# Altium schematic symbol library Schlib1.SchLib: 12 symbols
Pins are listed as number, name and electrical type; pins without a type are passive.

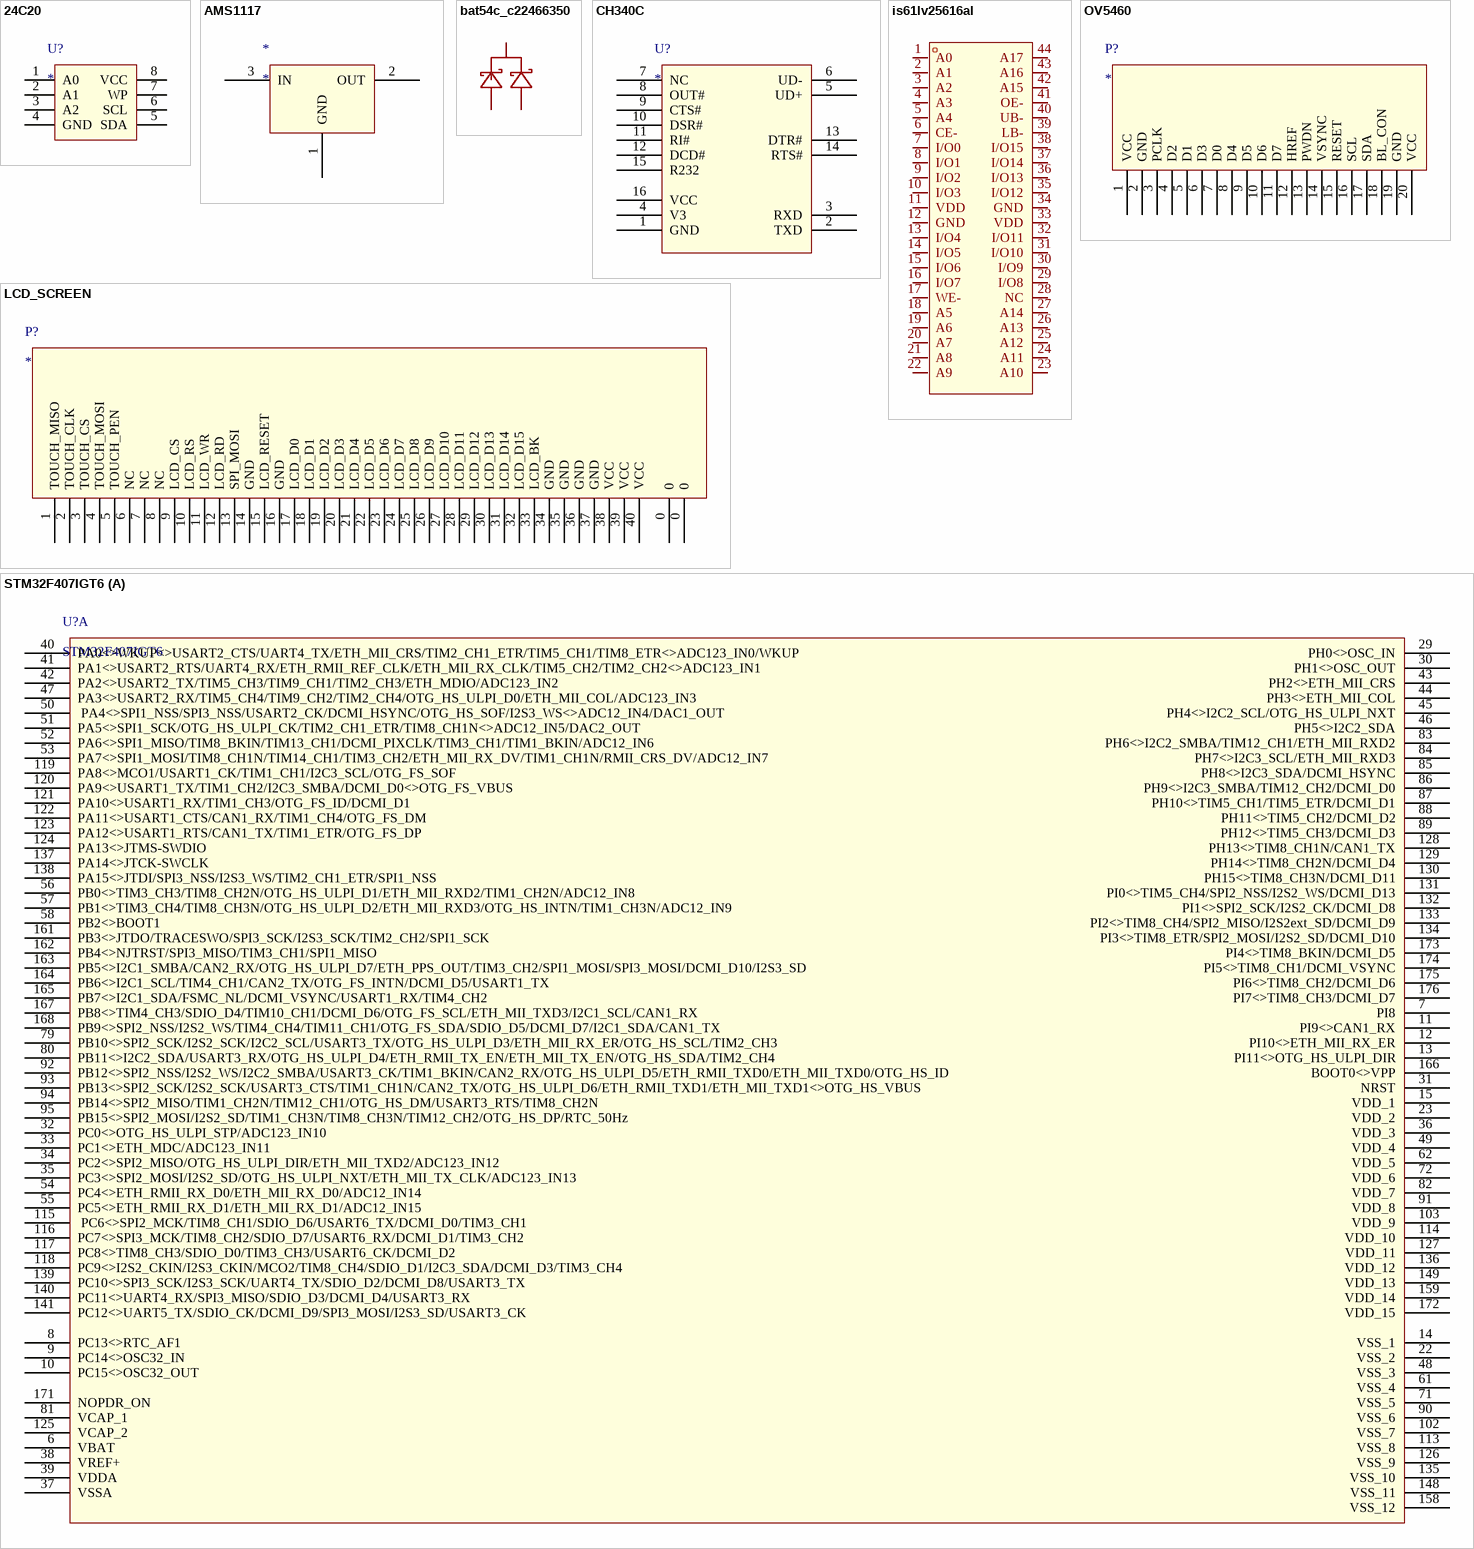
[diagram p0: symbols 24C20 to STM32F407IGT6]

## 24C20
designator U?
EEPROM
pins: 1 A0, 2 A1, 3 A2, 4 GND, 5 SDA, 6 SCL, 7 WP, 8 VCC

## AMS1117
designator *
pins: 1 GND, 2 OUT, 3 IN

## bat54c_c22466350
designator U??  (value not drawn)
二极管配置:1对共阴极;正向压降(Vf):1V@100mA;直流反向耐压(Vr):30V;整流电流:200mA;; Manufacturer: R+O(宏嘉诚); ManufacturerPart: BAT54C; AddInBom: yes; ModelId: 4be4999f02b344ffbcd0d3b39a4b0072; ModelName: SOT-23-3_L2.9-W1.3-P1.90-LS2.8-BR; ModelTransform: 110.236,114.173,0,0,0,0,0,0,0; Diode Configuration: 1对共阴极; Voltage - DC Reverse(Vr): 30V; Current - Rectified: 200mA; Reverse Leakage Current (Ir): 2uA@25V; Non-Repetitive Peak Forward Surge Current: 600mA; Symbol: BAT54C_C22466350; LCSC Part Name: 电压:30V 电流:0.2A; SupplierPart: C22466350; Supplier Footprint: SOT-23; JLCPCB Part Class: Extended Part; Datasheet: https://item.szlcsc.com/datasheet/BAT54C/24165509.html; Supplier: LCSC; ConvertToPcb: yes; FootprintName: SOT-23-3_L2.9-W1.3-P1.90-LS2.8-BR; Voltage - Forward(Vf@If): 1V@100mA; Operating Junction Temperature Range: -
footprint SOT-23-3_L2.9-W1.3-P1.90-LS2.8-BR
pins: 1 A, 2 A, 3 K

## CH340C
designator U?
pins: 1 GND, 2 TXD, 3 RXD, 4 V3, 5 UD+, 6 UD-, 7 NC, 8 OUT#, 9 CTS#, 10 DSR#, 11 RI#, 12 DCD#, 13 DTR#, 14 RTS#, 15 R232, 16 VCC

## is61lv25616al
designator U?, comment is61lv25616al-10tli-tr  (value not drawn)
存储容量:4Mbit;工作电压:3.3V~3.63V;; Manufacturer: ISSI(北京矽成); AddInBom: yes; ModelId: 560eb33016ce4e308706c564a2ec9c3c; ModelName: TSOP-44_L18.4-W10.2-H1.0-LS11.8-P0.80; ModelTransform: 465.06033,724.408,0,90,0,0,0,-0.0005,0; Interface: 并口(Parallel); Memory Size: 4Mbit; Access Time: 10ns; Supply Current (Icc): 110mA; Standby Current (Iq): 20mA; LCSC Part Name: IS61LV25616AL 10TLI TR; SupplierPart: C2063046; ManufacturerPart: IS61LV25616AL-10TLI-TR; Supplier Footprint: TSOPII-44-10.2mm; JLCPCB Part Class: Extended Part; Datasheet: https://item.szlcsc.com/datasheet/IS61LV25616AL-10TLI-TR/2154619.html; Supplier: LCSC; ConvertToPcb: yes; SymbolName: IS61LV25616AL-10TLI-TR; FootprintName: TSOP-44_L18.4-W10.2-P0.80-LS11.8-BL; Voltage - Supply: 3.3V~3.63V; Operating Temperature: -40℃~+85℃; Features: 自动掉电功能
footprint TSOP-44_L18.4-W10.2-P0.80-LS11.8-BL
pins: 1 A0, 2 A1, 3 A2, 4 A3, 5 A4, 6 CE-, 7 I/O0, 8 I/O1, 9 I/O2, 10 I/O3, 11 VDD, 12 GND, 13 I/O4, 14 I/O5, 15 I/O6, 16 I/O7, 17 WE-, 18 A5, 19 A6, 20 A7, 21 A8, 22 A9, 23 A10, 24 A11, 25 A12, 26 A13, 27 A14, 28 NC, 29 I/O8, 30 I/O9, 31 I/O10, 32 I/O11, 33 VDD, 34 GND, 35 I/O12, 36 I/O13, 37 I/O14, 38 I/O15, 39 LB-, 40 UB-, 41 OE-, 42 A15, 43 A16, 44 A17

## LCD_SCREEN
designator P?
pins: 0, 0, 1 TOUCH_MISO, 2 TOUCH_CLK, 3 TOUCH_CS, 4 TOUCH_MOSI, 5 TOUCH_PEN, 6 NC, 7 NC, 8 NC, 9 LCD_CS, 10 LCD_RS, 11 LCD_WR, 12 LCD_RD, 13 SPI_MOSI, 14 GND, 15 LCD_RESET, 16 GND, 17 LCD_D0, 18 LCD_D1, 19 LCD_D2, 20 LCD_D3, 21 LCD_D4, 22 LCD_D5, 23 LCD_D6, 24 LCD_D7, 25 LCD_D8, 26 LCD_D9, 27 LCD_D10, 28 LCD_D11, 29 LCD_D12, 30 LCD_D13, 31 LCD_D14, 32 LCD_D15, 33 LCD_BK, 34 GND, 35 GND, 36 GND, 37 GND, 38 VCC, 39 VCC, 40 VCC

## OV5460
designator P?
pins: 1 VCC, 2 GND, 3 PCLK, 4 D2, 5 D1, 6 D3, 7 D0, 8 D4, 9 D5, 10 D6, 11 D7, 12 HREF, 13 PWDN, 14 VSYNC, 15 RESET, 16 SCL, 17 SDA, 18 BL_CON, 19 GND, 20 VCC

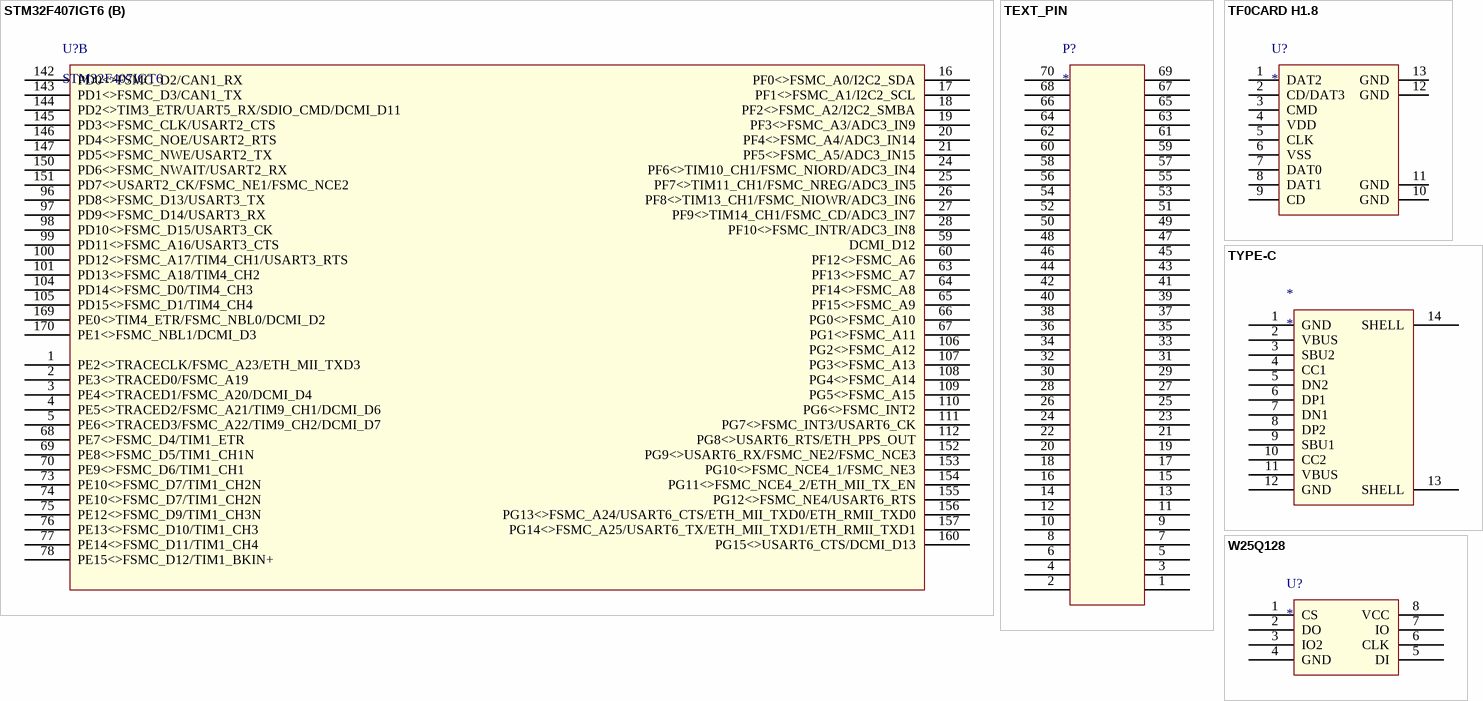
[diagram p1: symbols STM32F407IGT6 to W25Q128]

## STM32F407IGT6
designator U?
mcu
part A pins: 6 VBAT, 7 PI8, 8 PC13<>RTC_AF1, 9 PC14<>OSC32_IN, 10 PC15<>OSC32_OUT, 11 PI9<>CAN1_RX, 12 PI10<>ETH_MII_RX_ER, 13 PI11<>OTG_HS_ULPI_DIR, 14 VSS_1, 15 VDD_1, 22 VSS_2, 23 VDD_2, 29 PH0<>OSC_IN, 30 PH1<>OSC_OUT, 31 NRST, 32 PC0<>OTG_HS_ULPI_STP/ADC123_IN10, 33 PC1<>ETH_MDC/ADC123_IN11, 34 PC2<>SPI2_MISO/OTG_HS_ULPI_DIR/ETH_MII_TXD2/ADC123_IN12, 35 PC3<>SPI2_MOSI/I2S2_SD/OTG_HS_ULPI_NXT/ETH_MII_TX_CLK/ADC123_IN13, 36 VDD_3, 37 VSSA, 38 VREF+, 39 VDDA, 40 PA0<>WKUP<>USART2_CTS/UART4_TX/ETH_MII_CRS/TIM2_CH1_ETR/TIM5_CH1/TIM8_ETR<>ADC123_IN0/WKUP, 41 PA1<>USART2_RTS/UART4_RX/ETH_RMII_REF_CLK/ETH_MII_RX_CLK/TIM5_CH2/TIM2_CH2<>ADC123_IN1, 42 PA2<>USART2_TX/TIM5_CH3/TIM9_CH1/TIM2_CH3/ETH_MDIO/ADC123_IN2, 43 PH2<>ETH_MII_CRS, 44 PH3<>ETH_MII_COL, 45 PH4<>I2C2_SCL/OTG_HS_ULPI_NXT, 46 PH5<>I2C2_SDA, 47 PA3<>USART2_RX/TIM5_CH4/TIM9_CH2/TIM2_CH4/OTG_HS_ULPI_D0/ETH_MII_COL/ADC123_IN3, 48 VSS_3, 49 VDD_4, 50  PA4<>SPI1_NSS/SPI3_NSS/USART2_CK/DCMI_HSYNC/OTG_HS_SOF/I2S3_WS<>ADC12_IN4/DAC1_OUT, 51 PA5<>SPI1_SCK/OTG_HS_ULPI_CK/TIM2_CH1_ETR/TIM8_CH1N<>ADC12_IN5/DAC2_OUT, 52 PA6<>SPI1_MISO/TIM8_BKIN/TIM13_CH1/DCMI_PIXCLK/TIM3_CH1/TIM1_BKIN/ADC12_IN6, 53 PA7<>SPI1_MOSI/TIM8_CH1N/TIM14_CH1/TIM3_CH2/ETH_MII_RX_DV/TIM1_CH1N/RMII_CRS_DV/ADC12_IN7, 54 PC4<>ETH_RMII_RX_D0/ETH_MII_RX_D0/ADC12_IN14, 55 PC5<>ETH_RMII_RX_D1/ETH_MII_RX_D1/ADC12_IN15, 56 PB0<>TIM3_CH3/TIM8_CH2N/OTG_HS_ULPI_D1/ETH_MII_RXD2/TIM1_CH2N/ADC12_IN8, 57 PB1<>TIM3_CH4/TIM8_CH3N/OTG_HS_ULPI_D2/ETH_MII_RXD3/OTG_HS_INTN/TIM1_CH3N/ADC12_IN9, 58 PB2<>BOOT1, 61 VSS_4, 62 VDD_5, 71 VSS_5, 72 VDD_6, 79 PB10<>SPI2_SCK/I2S2_SCK/I2C2_SCL/USART3_TX/OTG_HS_ULPI_D3/ETH_MII_RX_ER/OTG_HS_SCL/TIM2_CH3, 80 PB11<>I2C2_SDA/USART3_RX/OTG_HS_ULPI_D4/ETH_RMII_TX_EN/ETH_MII_TX_EN/OTG_HS_SDA/TIM2_CH4, 81 VCAP_1, 82 VDD_7, 83 PH6<>I2C2_SMBA/TIM12_CH1/ETH_MII_RXD2, 84 PH7<>I2C3_SCL/ETH_MII_RXD3, 85 PH8<>I2C3_SDA/DCMI_HSYNC, 86 PH9<>I2C3_SMBA/TIM12_CH2/DCMI_D0, 87 PH10<>TIM5_CH1/TIM5_ETR/DCMI_D1, 88 PH11<>TIM5_CH2/DCMI_D2, 89 PH12<>TIM5_CH3/DCMI_D3, 90 VSS_6, 91 VDD_8, 92 PB12<>SPI2_NSS/I2S2_WS/I2C2_SMBA/USART3_CK/TIM1_BKIN/CAN2_RX/OTG_HS_ULPI_D5/ETH_RMII_TXD0/ETH_MII_TXD0/OTG_HS_ID, 93 PB13<>SPI2_SCK/I2S2_SCK/USART3_CTS/TIM1_CH1N/CAN2_TX/OTG_HS_ULPI_D6/ETH_RMII_TXD1/ETH_MII_TXD1<>OTG_HS_VBUS, 94 PB14<>SPI2_MISO/TIM1_CH2N/TIM12_CH1/OTG_HS_DM/USART3_RTS/TIM8_CH2N, 95 PB15<>SPI2_MOSI/I2S2_SD/TIM1_CH3N/TIM8_CH3N/TIM12_CH2/OTG_HS_DP/RTC_50Hz, 102 VSS_7, 103 VDD_9, 113 VSS_8, 114 VDD_10, 115  PC6<>SPI2_MCK/TIM8_CH1/SDIO_D6/USART6_TX/DCMI_D0/TIM3_CH1, 116 PC7<>SPI3_MCK/TIM8_CH2/SDIO_D7/USART6_RX/DCMI_D1/TIM3_CH2, 117 PC8<>TIM8_CH3/SDIO_D0/TIM3_CH3/USART6_CK/DCMI_D2, 118 PC9<>I2S2_CKIN/I2S3_CKIN/MCO2/TIM8_CH4/SDIO_D1/I2C3_SDA/DCMI_D3/TIM3_CH4, 119 PA8<>MCO1/USART1_CK/TIM1_CH1/I2C3_SCL/OTG_FS_SOF, 120 PA9<>USART1_TX/TIM1_CH2/I2C3_SMBA/DCMI_D0<>OTG_FS_VBUS, 121 PA10<>USART1_RX/TIM1_CH3/OTG_FS_ID/DCMI_D1, 122 PA11<>USART1_CTS/CAN1_RX/TIM1_CH4/OTG_FS_DM, 123 PA12<>USART1_RTS/CAN1_TX/TIM1_ETR/OTG_FS_DP, 124 PA13<>JTMS-SWDIO, 125 VCAP_2, 126 VSS_9, 127 VDD_11, 128 PH13<>TIM8_CH1N/CAN1_TX, 129 PH14<>TIM8_CH2N/DCMI_D4, 130 PH15<>TIM8_CH3N/DCMI_D11, 131 PI0<>TIM5_CH4/SPI2_NSS/I2S2_WS/DCMI_D13, 132 PI1<>SPI2_SCK/I2S2_CK/DCMI_D8, 133 PI2<>TIM8_CH4/SPI2_MISO/I2S2ext_SD/DCMI_D9, 134 PI3<>TIM8_ETR/SPI2_MOSI/I2S2_SD/DCMI_D10, 135 VSS_10, 136 VDD_12, 137 PA14<>JTCK-SWCLK, 138 PA15<>JTDI/SPI3_NSS/I2S3_WS/TIM2_CH1_ETR/SPI1_NSS, 139 PC10<>SPI3_SCK/I2S3_SCK/UART4_TX/SDIO_D2/DCMI_D8/USART3_TX, 140 PC11<>UART4_RX/SPI3_MISO/SDIO_D3/DCMI_D4/USART3_RX, 141 PC12<>UART5_TX/SDIO_CK/DCMI_D9/SPI3_MOSI/I2S3_SD/USART3_CK, 148 VSS_11, 149 VDD_13, 158 VSS_12, 159 VDD_14, 161 PB3<>JTDO/TRACESWO/SPI3_SCK/I2S3_SCK/TIM2_CH2/SPI1_SCK, 162 PB4<>NJTRST/SPI3_MISO/TIM3_CH1/SPI1_MISO, 163 PB5<>I2C1_SMBA/CAN2_RX/OTG_HS_ULPI_D7/ETH_PPS_OUT/TIM3_CH2/SPI1_MOSI/SPI3_MOSI/DCMI_D10/I2S3_SD, 164 PB6<>I2C1_SCL/TIM4_CH1/CAN2_TX/OTG_FS_INTN/DCMI_D5/USART1_TX, 165 PB7<>I2C1_SDA/FSMC_NL/DCMI_VSYNC/USART1_RX/TIM4_CH2, 166 BOOT0<>VPP, 167 PB8<>TIM4_CH3/SDIO_D4/TIM10_CH1/DCMI_D6/OTG_FS_SCL/ETH_MII_TXD3/I2C1_SCL/CAN1_RX, 168 PB9<>SPI2_NSS/I2S2_WS/TIM4_CH4/TIM11_CH1/OTG_FS_SDA/SDIO_D5/DCMI_D7/I2C1_SDA/CAN1_TX, 171 NOPDR_ON, 172 VDD_15, 173 PI4<>TIM8_BKIN/DCMI_D5, 174 PI5<>TIM8_CH1/DCMI_VSYNC, 175 PI6<>TIM8_CH2/DCMI_D6, 176 PI7<>TIM8_CH3/DCMI_D7
part B pins: 1 PE2<>TRACECLK/FSMC_A23/ETH_MII_TXD3, 2 PE3<>TRACED0/FSMC_A19, 3 PE4<>TRACED1/FSMC_A20/DCMI_D4, 4 PE5<>TRACED2/FSMC_A21/TIM9_CH1/DCMI_D6, 5 PE6<>TRACED3/FSMC_A22/TIM9_CH2/DCMI_D7, 16 PF0<>FSMC_A0/I2C2_SDA, 17 PF1<>FSMC_A1/I2C2_SCL, 18 PF2<>FSMC_A2/I2C2_SMBA, 19 PF3<>FSMC_A3/ADC3_IN9, 20 PF4<>FSMC_A4/ADC3_IN14, 21 PF5<>FSMC_A5/ADC3_IN15, 24 PF6<>TIM10_CH1/FSMC_NIORD/ADC3_IN4, 25 PF7<>TIM11_CH1/FSMC_NREG/ADC3_IN5, 26 PF8<>TIM13_CH1/FSMC_NIOWR/ADC3_IN6, 27 PF9<>TIM14_CH1/FSMC_CD/ADC3_IN7, 28 PF10<>FSMC_INTR/ADC3_IN8, 59 DCMI_D12, 60 PF12<>FSMC_A6, 63 PF13<>FSMC_A7, 64 PF14<>FSMC_A8, 65 PF15<>FSMC_A9, 66 PG0<>FSMC_A10, 67 PG1<>FSMC_A11, 68 PE7<>FSMC_D4/TIM1_ETR, 69 PE8<>FSMC_D5/TIM1_CH1N, 70 PE9<>FSMC_D6/TIM1_CH1, 73 PE10<>FSMC_D7/TIM1_CH2N, 74 PE10<>FSMC_D7/TIM1_CH2N, 75 PE12<>FSMC_D9/TIM1_CH3N, 76 PE13<>FSMC_D10/TIM1_CH3, 77 PE14<>FSMC_D11/TIM1_CH4, 78 PE15<>FSMC_D12/TIM1_BKIN+, 96 PD8<>FSMC_D13/USART3_TX, 97 PD9<>FSMC_D14/USART3_RX, 98 PD10<>FSMC_D15/USART3_CK, 99 PD11<>FSMC_A16/USART3_CTS, 100 PD12<>FSMC_A17/TIM4_CH1/USART3_RTS, 101 PD13<>FSMC_A18/TIM4_CH2, 104 PD14<>FSMC_D0/TIM4_CH3, 105 PD15<>FSMC_D1/TIM4_CH4, 106 PG2<>FSMC_A12, 107 PG3<>FSMC_A13, 108 PG4<>FSMC_A14, 109 PG5<>FSMC_A15, 110 PG6<>FSMC_INT2, 111 PG7<>FSMC_INT3/USART6_CK, 112 PG8<>USART6_RTS/ETH_PPS_OUT, 142 PD0<>FSMC_D2/CAN1_RX, 143 PD1<>FSMC_D3/CAN1_TX, 144 PD2<>TIM3_ETR/UART5_RX/SDIO_CMD/DCMI_D11, 145 PD3<>FSMC_CLK/USART2_CTS, 146 PD4<>FSMC_NOE/USART2_RTS, 147 PD5<>FSMC_NWE/USART2_TX, 150 PD6<>FSMC_NWAIT/USART2_RX, 151 PD7<>USART2_CK/FSMC_NE1/FSMC_NCE2, 152 PG9<>USART6_RX/FSMC_NE2/FSMC_NCE3, 153 PG10<>FSMC_NCE4_1/FSMC_NE3, 154 PG11<>FSMC_NCE4_2/ETH_MII_TX_EN, 155 PG12<>FSMC_NE4/USART6_RTS, 156 PG13<>FSMC_A24/USART6_CTS/ETH_MII_TXD0/ETH_RMII_TXD0, 157 PG14<>FSMC_A25/USART6_TX/ETH_MII_TXD1/ETH_RMII_TXD1, 160 PG15<>USART6_CTS/DCMI_D13, 169 PE0<>TIM4_ETR/FSMC_NBL0/DCMI_D2, 170 PE1<>FSMC_NBL1/DCMI_D3

## TEXT_PIN
designator P?
pins: 1, 2, 3, 4, 5, 6, 7, 8, 9, 10, 11, 12, 13, 14, 15, 16, 17, 18, 19, 20, 21, 22, 23, 24, 25, 26, 27, 28, 29, 30, 31, 32, 33, 34, 35, 36, 37, 38, 39, 40, 41, 42, 43, 44, 45, 46, 47, 48, 49, 50, 51, 52, 53, 54, 55, 56, 57, 58, 59, 60, 61, 62, 63, 64, 65, 66, 67, 68, 69, 70

## TF0CARD H1.8
designator U?
pins: 1 DAT2, 2 CD/DAT3, 3 CMD, 4 VDD, 5 CLK, 6 VSS, 7 DAT0, 8 DAT1, 9 CD, 10 GND, 11 GND, 12 GND, 13 GND

## TYPE-C
designator *
pins: 1 GND, 2 VBUS, 3 SBU2, 4 CC1, 5 DN2, 6 DP1, 7 DN1, 8 DP2, 9 SBU1, 10 CC2, 11 VBUS, 12 GND, 13 SHELL, 14 SHELL

## W25Q128
designator U?
pins: 1 CS, 2 DO, 3 IO2, 4 GND, 5 DI, 6 CLK, 7 IO, 8 VCC